# Altium footprint library LQW18AN10NG80D.PcbLib: 1 footprints
Each footprint in its own frame and in the unit in brackets; x right, y up, seen from the top. Pads: shape width x height; smd on the part's side, far side on the other; paste and mask are expansions set on the pad; w line width, h text height; cw(c..) or ccw(c..) is an arc to the next point about the centre after c.
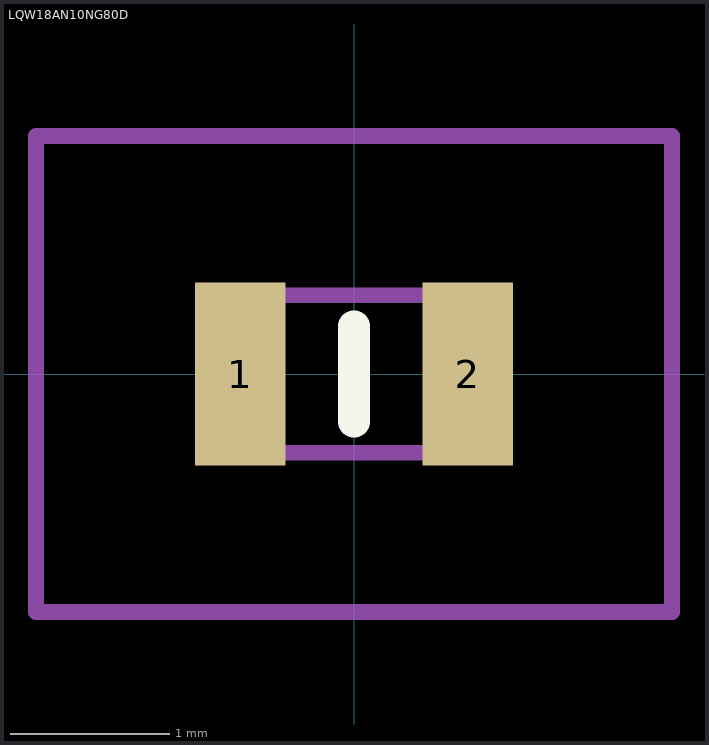
[diagram p0: the footprint, top view; thin cyan lines are the x and y axes]

## LQW18AN10NG80D [mm]
pads (2):
  rect 0.57x1.15 smd: 1(-0.715,0) 2(0.715,0)
Top Overlay:
  lines w0.2: 0,-0.3 0,0.3
Mechanical 15:
  lines w0.1: -0.825,-0.495 0.825,-0.495 0.825,0.495 -0.825,0.495 -0.825,-0.495
Mechanical 20:
  lines w0.1: -2,-1.495 2,-1.495 2,1.495 -2,1.495 -2,-1.495